# Altium schematic symbol library Diode%.SchLib: 376 symbols (part 2 of 9)
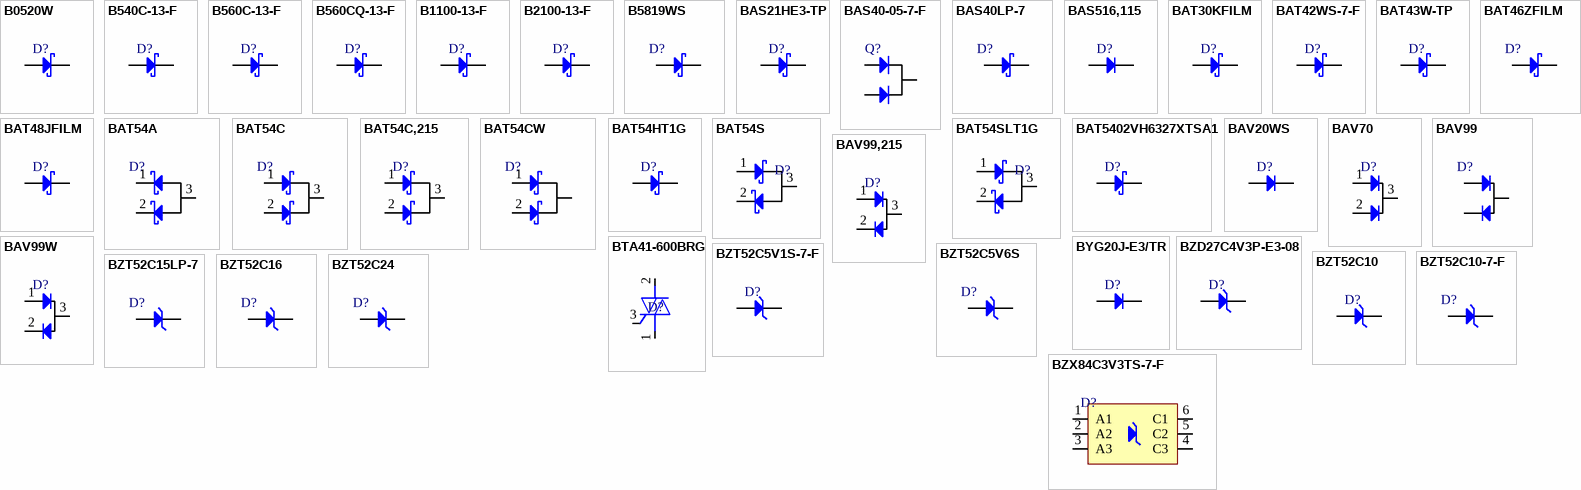
[diagram p10: symbols B0520W to BZX84C3V3TS-7-F]

## B2100-13-F
designator D?
DIODE SCHOTTKY 100V 2A SMB; Manufacturer: Diodes; Manufacturer Part Number: B2100-13-F; Package Body Material: Plastic; Diode Element Material: SILICON; Max Reverse Current: 500uA; Peak Non-Repetitive Surge Current: 50A; Number of Elements: 1; Forward Voltage: 790mV; Polarity: Standard; Value: 75pF; Application(s): EFFICIENCY; Diode Type: RECTIFIER; Time @ Peak Reflow Temperature-Max (s): 5s; Supplier: Future Electronics; LCSC Part Number: C110479; RoHS: Yes; Item Type: Diode; Stock: 591000; Pricing: 3000=0.0991, 6000=0.0966, 12000=0.0942, 15000=0.0934, 45000=0.0888 (USD); Mounting Technology: Surface Mount; Case/Package: SMB; Pins: 2; Weight: 0.00328oz; Package Shape: Rectangular; Terminal Finish: Tin; Min Operating Temperature: -65°C; Max Operating Temperature: 150°C; Forward Current: 2A; Max Repetitive Reverse Voltage (Vrrm): 100V; Package Quantity: 3000; Packaging: Tape and Reel; Average Rectified Current: 2A; Max Forward Surge Current (Ifsm): 50A; Termination: SMD/SMT; Voltage Rating (DC): 100V; Current Rating: 2A; Output Current: 2A; Max Reverse Voltage (DC): 100V; Series: -; JESD-30 Code: R-PDSO-C2; Terminal Form: C BEND; Terminal Position: DUAL; Number of Phases: 1; Surface Mount: Yes; Moisture Sensitivity Level: 1; Technology: SCHOTTKY; Peak Reflow Temperature (Cel): 245°C; Reverse Voltage: 100V; Length: 4.57mm; Width: 3.94mm; Height: 2.62mm; Radiation Hardening: No; Reach SVHC Compliant: No; Lead Free: Lead Free; RoHS Compliant: Yes; ComponentLink1URL: https://datasheet.ciiva.com/34302/1538742-34302357.pdf?src-supplier=Jameco; ComponentLink1Description: https://datasheet.ciiva.com/34302/1538742-34302357.pdf?src-supplier=Jameco; ComponentLink2URL: https://datasheet.ciiva.com/1177/ds30021-1177418.pdf?src-supplier=Element14; ComponentLink2Description: https://datasheet.ciiva.com/1177/ds30021-1177418.pdf?src-supplier=Element14; ComponentLink3URL: https://datasheet.ciiva.com/4715/ds30021-83821-4715727.pdf?src-supplier=Mouser; ComponentLink3Description: https://datasheet.ciiva.com/4715/ds30021-83821-4715727.pdf?src-supplier=Mouser; ComponentLink4URL: https://datasheet.ciiva.com/8300/ds30021-8300525.pdf?src-supplier=Avnet; ComponentLink4Description: https://datasheet.ciiva.com/8300/ds30021-8300525.pdf?src-supplier=Avnet; ComponentLink5URL: https://datasheet.ciiva.com/16217/ds30021-16217820.pdf?src-supplier=Future+Electronics; ComponentLink5Description: https://datasheet.ciiva.com/16217/ds30021-16217820.pdf?src-supplier=Future+Electronics; ComponentLink6URL: https://datasheet.ciiva.com/8303/ds30021-8303003.pdf?src-supplier=Avnet; ComponentLink6Description: https://datasheet.ciiva.com/8303/ds30021-8303003.pdf?src-supplier=Avnet; ComponentLink7URL: https://datasheet.ciiva.com/913/ds30021-913956.pdf?src-supplier=Digikey; ComponentLink7Description: https://datasheet.ciiva.com/913/ds30021-913956.pdf?src-supplier=Digikey; ComponentLink8URL: https://datasheet.ciiva.com/913/ds30021-913957.pdf?src-supplier=Digikey; ComponentLink8Description: https://datasheet.ciiva.com/913/ds30021-913957.pdf?src-supplier=Digikey; ComponentLink9URL: https://datasheet.ciiva.com/913/ds30021-913955.pdf?src-supplier=Digikey; ComponentLink9Description: https://datasheet.ciiva.com/913/ds30021-913955.pdf?src-supplier=Digikey
footprint SMB_
pins: 1 A, 2 K

## B5819WS
designator D?
DIODE SCHOTTKY 40V 1A SOD323; Manufacturer: MDD; Manufacturer Part Number: B5819WS-TP; Max Surge Current: 10A; Forward Voltage: 900mV; Max Reverse Leakage Current: 1mA; Element Configuration: Single; Supplier 1: Arrow Electronics; RoHS: Yes; Category: Rectifier Diodes; Stock 1: 1701; Pricing 1: 1=0.34370, 10=0.18990, 25=0.18810, 100=0.11820, 250=0.11700, 500=0.08890, 1000=0.07420 (USD); Mount: Surface Mount; Number of Pins: 2; Min Operating Temperature: -65°C; Max Operating Temperature: 125°C; Package Quantity: 1; Packaging: Tape and Reel; Average Rectified Current: 1A; Peak Non-Repetitive Surge Current: 10A; Max Reverse Voltage (DC): 40V; Series: -; Radiation Hardening: No; RoHS Compliant: Yes; Lead Free: Lead Free; Supplier Part Number 1: B5819WS-TP; ComponentLink1Description: LCSC; ComponentLink1URL: https://lcsc.com/product-detail/Schottky-Barrier-Diodes-SBD_MDD-Microdiode-Electronics-B5819WS_C64886.html; LCSC Part Number: C22624; Item Type: Diode
footprint SOD-323 (40V 600mV@1A 1A SOD-323 Schottky Barrier Diodes (SBD))
pins: 1 K, 2 A

## BAS21HE3-TP
designator D?
200V Independent Type 1.25V@200mA 50ns 200mA SOT-23 Switching Diodes ROHS; Manufacturer: MCC; Manufacturer Part Number: BAS21HE3-TP; Item Type: Diode; Package: SOT-23; LCSC Part Number: C3313195; ComponentLink1Description: LCSC; ComponentLink1URL: https://www.lcsc.com/product-detail/Switching-Diodes_MCC-Micro-Commercial-Components-BAS21HE3-TP_C3313195.html
footprint SOT-23 (TRANS NPN 40V 0.6A SOT23)
pins: 1 A, 3 K

## BAS40-05-7-F
designator Q?
DIODE ARR SCHOTT 40V 200MA SOT23; Manufacturer: Diodes; Manufacturer Part Number: BAS40-05-7-F; Item Type: Schottky Diodes; Reverse Recovery Time: 5ns; Peak Non-Repetitive Surge Current: 600mA; Forward Voltage: 1V; Max Reverse Current: 200nA; Max Power Dissipation: 350mW; Value: 4pF; Supplier: Rs; LCSC Part Number: C134359; RoHS: Yes; Stock: 2400; Pricing: 125=0.607, 250=0.53, 625=0.512, 1250=0.503 (DKK); Mounting Technology: Surface Mount; Case/Package: SOT-23; Pins: 3; Weight: 0.000282oz; Min Operating Temperature: -55°C; Max Operating Temperature: 125°C; Forward Current: 200mA; Max Repetitive Reverse Voltage (Vrrm): 40V; Package Quantity: 3000; Packaging: Tape and Reel; Average Rectified Current: 200mA; Power Dissipation: 350mW; Max Forward Surge Current (Ifsm): 600mA; Termination: SMD/SMT; Power Rating: 350mW; Max Reverse Voltage (DC): 40V; Series: -; Reverse Voltage: 40V; Length: 3.05mm; Width: 1.4mm; Height: 1mm; Radiation Hardening: No; Reach SVHC Compliant: No; Lead Free: Lead Free; RoHS Compliant: Yes; ComponentLink1URL: https://datasheet.ciiva.com/4715/ds11006-83462-4715645.pdf?src-supplier=Mouser; ComponentLink1Description: https://datasheet.ciiva.com/4715/ds11006-83462-4715645.pdf?src-supplier=Mouser
footprint SOT-23 (TRANS NPN 40V 0.6A SOT23)
pins: 1, 2, 3

## BAS40LP-7
designator D?
DIODE SCHOTTKY 40V 200MA 2DFN; Manufacturer: Diodes; Manufacturer Part Number: BAS40LP-7; Reverse Recovery Time: 5ns; Peak Non-Repetitive Surge Current: 600mA; Element Configuration: Single; Polarity: Standard; Forward Voltage: 1V; Max Reverse Current: 200nA; Power Dissipation: 250mW; Capacitance: 2.3pF; Supplier 1: Digi-Key; RoHS: Yes; Category: Schottky Diodes; Stock 1: 297276; Pricing 1: 1=0.40000, 10=0.32200, 100=0.21910, 500=0.16436, 1000=0.12326 (USD); Mount: Surface Mount; Case/Package: DFN; Number of Pins: 2; Contact Plating: Gold; Case Code (Imperial): 0402; Case Code (Metric): 1006; Min Operating Temperature: -55°C; Max Operating Temperature: 125°C; Packaging: Tape and Reel; Forward Current: 200mA; Max Repetitive Reverse Voltage (Vrrm): 40V; Package Quantity: 3000; Average Rectified Current: 200mA; Output Current: 200mA; Max Reverse Voltage (DC): 40V; Series: -; Max Forward Surge Current (Ifsm): 600mA; Power Rating: 250mW; Length: 1mm; Width: 0.6mm; Height: 0.47mm; Radiation Hardening: No; RoHS Compliant: Yes; Reach SVHC Compliant: Yes; Lead Free: Lead Free; ComponentLink1URL: https://datasheet.ciiva.com/4715/ds30503-87596-4715640.pdf?src-supplier=Mouser; ComponentLink1Description: https://datasheet.ciiva.com/4715/ds30503-87596-4715640.pdf?src-supplier=Mouser; ComponentLink2URL: https://datasheet.ciiva.com/16199/ds30503-16199776.pdf?src-supplier=Future+Electronics; ComponentLink2Description: https://datasheet.ciiva.com/16199/ds30503-16199776.pdf?src-supplier=Future+Electronics; ComponentLink3URL: https://datasheet.ciiva.com/1180/ds30503-1180004.pdf?src-supplier=Element14; ComponentLink3Description: https://datasheet.ciiva.com/1180/ds30503-1180004.pdf?src-supplier=Element14; ComponentLink4URL: https://datasheet.ciiva.com/8303/ds30503-8303229.pdf?src-supplier=Avnet; ComponentLink4Description: https://datasheet.ciiva.com/8303/ds30503-8303229.pdf?src-supplier=Avnet; ComponentLink5URL: https://datasheet.ciiva.com/914/ds30503-914315.pdf?src-supplier=Digi-Key; ComponentLink5Description: https://datasheet.ciiva.com/914/ds30503-914315.pdf?src-supplier=Digi-Key; Supplier Part Number 1: BAS40LPDICT-ND; LCSC Part Number: C124200; Item Type: Diode
footprint DFN1006-2L_
pins: 1 K, 2 A

## BAS516,115
designator D?
DIODE GEN PURP 100V 250MA SOD523; Manufacturer: Nexperia; Manufacturer Part Number: BAS516,115; Max Reverse Current: 50uA; Max Forward Surge Current (Ifsm): 4A; Value: 1pF; Supplier: Future Electronics; LCSC Part Number: C10037; RoHS: Yes; Item Type: Diode; Stock: 4176000; Pricing: 3000=0.0153, 12000=0.0146, 30000=0.0142, 75000=0.0138, 120000=0.0132 (USD); Pins: 2NUMBER; Max Repetitive Reverse Voltage (Vrrm): 100V; Forward Current: 250mA; Reverse Voltage: 100V; Height: 650um; RoHS Compliant: Yes; ComponentLink1URL: http://www.farnell.com/datasheets/1856332.pdf?src-supplier=Farnell; ComponentLink1Description: http://www.farnell.com/datasheets/1856332.pdf?src-supplier=Farnell; ComponentLink2URL: https://datasheet.octopart.com/BAS516%2C115-Nexperia-datasheet-32749520.pdf?src-supplier=Newark; ComponentLink2Description: https://datasheet.octopart.com/BAS516%2C115-Nexperia-datasheet-32749520.pdf?src-supplier=Newark; ComponentLink3URL: https://assets.nexperia.com/documents/data-sheet/BAS16_SER.pdf?src-supplier=Digikey; ComponentLink3Description: https://assets.nexperia.com/documents/data-sheet/BAS16_SER.pdf?src-supplier=Digikey; ComponentLink4URL: https://datasheet.octopart.com/BAS516%2C115-Nexperia-datasheet-81455687.pdf?src-supplier=TME; ComponentLink4Description: https://datasheet.octopart.com/BAS516%2C115-Nexperia-datasheet-81455687.pdf?src-supplier=TME
footprint SOD-523 (SOD-523 Schottky Barrier Diodes (SBD) ROHS)
pins: 1 A, 2 K

## BAT30KFILM
designator D?
DIODE SCHOTTKY 30V 300MA SOD523; Manufacturer: STMicroelectronics; Manufacturer Part Number: BAT30KFILM; Supplier: Digikey; LCSC Part Number: C2926449; RoHS: Yes; Item Type: Diode; Stock: 129643; Pricing: 1=0.33, 10=0.204, 100=0.1279, 500=0.09468, 1000=0.08393 (USD); ComponentLink1URL: https://datasheet.ciiva.com/15192/getdatasheetpartid-146449-15192970.pdf?src-supplier=Verical; ComponentLink1Description: https://datasheet.ciiva.com/15192/getdatasheetpartid-146449-15192970.pdf?src-supplier=Verical; ComponentLink2URL: https://datasheet.ciiva.com/16418/cd00126118-16418392.pdf?src-supplier=Future+Electronics; ComponentLink2Description: https://datasheet.ciiva.com/16418/cd00126118-16418392.pdf?src-supplier=Future+Electronics; ComponentLink3URL: https://datasheet.ciiva.com/915/cd00126118-915601.pdf?src-supplier=Digikey; ComponentLink3Description: https://datasheet.ciiva.com/915/cd00126118-915601.pdf?src-supplier=Digikey; ComponentLink4URL: https://datasheet.ciiva.com/915/cd00126118-915602.pdf?src-supplier=Digikey; ComponentLink4Description: https://datasheet.ciiva.com/915/cd00126118-915602.pdf?src-supplier=Digikey; ComponentLink5URL: https://datasheet.ciiva.com/915/cd00126118-915603.pdf?src-supplier=Digikey; ComponentLink5Description: https://datasheet.ciiva.com/915/cd00126118-915603.pdf?src-supplier=Digikey
footprint SOD-523 (SOD-523 Schottky Barrier Diodes (SBD) ROHS)
pins: 1 A, 2 K

## BAT42WS-7-F
designator D?
DIODE SCHOTTKY 30V 200MA SOD323; Manufacturer: Diodes; Manufacturer Part Number: BAT42WS-7-F; Supplier: Future Electronics; LCSC Part Number: C134397; RoHS: Yes; Item Type: Diode; Stock: 6000; Pricing: 3000=0.0556, 9000=0.0535, 15000=0.0526, 30000=0.0499, 45000=0.0506, 60000=0.048, 75000=0.0489 (USD); ComponentLink1URL: https://datasheet.ciiva.com/4715/ds30100-83070-4715539.pdf?src-supplier=Mouser; ComponentLink1Description: https://datasheet.ciiva.com/4715/ds30100-83070-4715539.pdf?src-supplier=Mouser; ComponentLink2URL: https://datasheet.ciiva.com/8301/ds30100-8301357.pdf?src-supplier=Avnet; ComponentLink2Description: https://datasheet.ciiva.com/8301/ds30100-8301357.pdf?src-supplier=Avnet; ComponentLink3URL: https://datasheet.ciiva.com/1180/ds30100-1180188.pdf?src-supplier=Element14; ComponentLink3Description: https://datasheet.ciiva.com/1180/ds30100-1180188.pdf?src-supplier=Element14; ComponentLink4URL: https://datasheet.ciiva.com/912/ds30100-912909.pdf?src-supplier=Digikey; ComponentLink4Description: https://datasheet.ciiva.com/912/ds30100-912909.pdf?src-supplier=Digikey; ComponentLink5URL: https://datasheet.ciiva.com/912/ds30100-912910.pdf?src-supplier=Digikey; ComponentLink5Description: https://datasheet.ciiva.com/912/ds30100-912910.pdf?src-supplier=Digikey; ComponentLink6URL: https://datasheet.ciiva.com/912/ds30100-912911.pdf?src-supplier=Digikey; ComponentLink6Description: https://datasheet.ciiva.com/912/ds30100-912911.pdf?src-supplier=Digikey
footprint SOD-323
pins: 1 K, 2 A

## BAT43W-TP
designator D?
DIODE SCHOTTKY 30V 200MA SOD123; Manufacturer: Micro Commercial Co; Manufacturer Part Number: BAT43W-TP; Package: SOD-123; LCSC Part Number: C914267; Item Type: Diode; ComponentLink1Description: LCSC; ComponentLink1URL: https://www.lcsc.com/product-detail/Schottky-Barrier-Diodes-SBD_MCC-Micro-Commercial-Components-BAT43W-TP_C914267.html
footprint SOD-123
pins: 1 A, 2 K

## BAT46ZFILM
designator D?
DIODE SCHOTTKY 100V 150MA SOD123; Manufacturer: STMicroelectronics; Manufacturer Part Number: BAT46ZFILM; Peak Non-Repetitive Surge Current: 1A; Forward Voltage: 1V; Max Reverse Current: 5uA; Polarity: Standard; Current Rating: 160mA; Value: 10pF; Item Type: Schottky Diode; Supplier: Mouser; Supplier Part Number: 511-BAT46ZFILM; RoHS: Yes; Category: Rectifier Diodes; Stock: 123459; Pricing: 1=0.44, 10=0.307, 50=0.307, 100=0.124, 1000=0.093, 10000=0.064 (USD); Mounting Technology: Surface Mount; Pins: 2; Min Operating Temperature: -65°C; Max Operating Temperature: 150°C; Forward Current: 150mA; Max Repetitive Reverse Voltage (Vrrm): 100V; Max Surge Current: 1A; Package Quantity: 3000; Packaging: Tape and Reel; Max Reverse Leakage Current: 5uA; Average Rectified Current: 150mA; Max Forward Surge Current (Ifsm): 1A; Voltage Rating (DC): 100V; Output Current: 150mA; Max Reverse Voltage (DC): 100V; Series: -; Length: 2.85mm; Width: 1.7mm; Height: 1.35mm; Radiation Hardening: No; Reach SVHC Compliant: No; Lead Free: Lead Free; RoHS Compliant: Yes; ComponentLink1URL: https://datasheet.ciiva.com/23920/cd00004930-23920128.pdf?src-supplier=Newark; ComponentLink1Description: https://datasheet.ciiva.com/23920/cd00004930-23920128.pdf?src-supplier=Newark; ComponentLink2URL: https://datasheet.ciiva.com/14168/cd00004930-14168058.pdf?src-supplier=Distrelec; ComponentLink2Description: https://datasheet.ciiva.com/14168/cd00004930-14168058.pdf?src-supplier=Distrelec; ComponentLink3URL: https://datasheet.ciiva.com/4714/cd00004930-111868-4714530.pdf?src-supplier=Mouser; ComponentLink3Description: https://datasheet.ciiva.com/4714/cd00004930-111868-4714530.pdf?src-supplier=Mouser; ComponentLink4URL: https://datasheet.ciiva.com/17097/bat46zfilm-17097700.pdf?src-supplier=Allied+Electronics; ComponentLink4Description: https://datasheet.ciiva.com/17097/bat46zfilm-17097700.pdf?src-supplier=Allied+Electronics; ComponentLink5URL: https://datasheet.ciiva.com/22733/1761349-22733179.pdf?src-supplier=Element14; ComponentLink5Description: https://datasheet.ciiva.com/22733/1761349-22733179.pdf?src-supplier=Element14; ComponentLink6URL: https://datasheet.ciiva.com/915/cd00004930-915572.pdf?src-supplier=Digi-Key; ComponentLink6Description: https://datasheet.ciiva.com/915/cd00004930-915572.pdf?src-supplier=Digi-Key; ComponentLink7URL: https://datasheet.ciiva.com/915/cd00004930-915571.pdf?src-supplier=Digi-Key; ComponentLink7Description: https://datasheet.ciiva.com/915/cd00004930-915571.pdf?src-supplier=Digi-Key; ComponentLink8URL: https://datasheet.ciiva.com/915/cd00004930-915573.pdf?src-supplier=Digi-Key; ComponentLink8Description: https://datasheet.ciiva.com/915/cd00004930-915573.pdf?src-supplier=Digi-Key; ComponentLink9URL: https://datasheet.ciiva.com/16221/cd00004930-16221159.pdf?src-supplier=Future+Electronics; ComponentLink9Description: https://datasheet.ciiva.com/16221/cd00004930-16221159.pdf?src-supplier=Future+Electronics; ComponentLink10URL: https://datasheet.ciiva.com/15144/getdatasheetpartid-89559-15144645.pdf?src-supplier=Verical; ComponentLink10Description: https://datasheet.ciiva.com/15144/getdatasheetpartid-89559-15144645.pdf?src-supplier=Verical; LCSC Part Number: C283255
footprint SOD-123
pins: 1 A, 2 K

## BAT48JFILM
designator D?
DIODE SCHOTTKY 40V 350MA SOD323; Manufacturer: STMicroelectronics; Manufacturer Part Number: BAT48JFILM; Supplier: Future Electronics; LCSC Part Number: C2798199; RoHS: Yes; Item Type: Diode; Stock: 21000; Pricing: 3000=0.0329, 9000=0.0316, 15000=0.031, 30000=0.0303, 60000=0.0291 (USD); ComponentLink1URL: https://datasheet.ciiva.com/23920/1449576-23920129.pdf?src-supplier=Newark; ComponentLink1Description: https://datasheet.ciiva.com/23920/1449576-23920129.pdf?src-supplier=Newark; ComponentLink2URL: https://datasheet.ciiva.com/4714/cd00130229-113731-4714649.pdf?src-supplier=Mouser; ComponentLink2Description: https://datasheet.ciiva.com/4714/cd00130229-113731-4714649.pdf?src-supplier=Mouser; ComponentLink3URL: https://datasheet.ciiva.com/915/cd00130229-915689.pdf?src-supplier=Digikey; ComponentLink3Description: https://datasheet.ciiva.com/915/cd00130229-915689.pdf?src-supplier=Digikey; ComponentLink4URL: https://datasheet.ciiva.com/915/cd00130229-915690.pdf?src-supplier=Digikey; ComponentLink4Description: https://datasheet.ciiva.com/915/cd00130229-915690.pdf?src-supplier=Digikey; ComponentLink5URL: https://datasheet.ciiva.com/915/cd00130229-915691.pdf?src-supplier=Digikey; ComponentLink5Description: https://datasheet.ciiva.com/915/cd00130229-915691.pdf?src-supplier=Digikey; ComponentLink6URL: https://datasheet.ciiva.com/16206/cd00130229-16206668.pdf?src-supplier=Future+Electronics; ComponentLink6Description: https://datasheet.ciiva.com/16206/cd00130229-16206668.pdf?src-supplier=Future+Electronics
footprint SOD-323
pins: 1 K, 2 A

## BAT54A
designator D?
Diode Small Signal Schottky 30V 0.2A Automotive 3-Pin SOT-23 T/R; Manufacturer: MDD; Manufacturer Part Number: BAT54A; Package: SOT-23; ComponentLink2Description: LCSC; ComponentLink2URL: https://www.lcsc.com/product-detail/Schottky-Barrier-Diodes-SBD_MDD-Microdiode-Electronics-BAT54A_C3013395.html; LCSC Part Number: C3013395; Item Type: Diode
footprint SOT-23 (TRANS NPN 40V 0.6A SOT23)
pins: 1 K, 2 K, 3 A

## BAT54C
designator D?
30V Dual Common Cathode 1V@100mA 200mA SOT-23(TO-236) Schottky Barrier Diodes (SBD) ROHS; Manufacturer Part Number: BAT54C; Manufacturer: Shandong Jingdao Microelectronics; Item Type: Diode; LCSC Part Number: C2762215; ComponentLink1Description: LCSC; ComponentLink1URL: https://www.lcsc.com/product-detail/Schottky-Barrier-Diodes-SBD_Shandong-Jingdao-Microelectronics-BAT54C_C2762215.html; Package: SOT-23(TO-236)
footprint SOT-23 (TRANS NPN 40V 0.6A SOT23)
pins: 1 A, 2 A, 3 K

## BAT54C,215
designator D?
DIODE ARR SCHOTT 30V TO236AB; Manufacturer: Nexperia; Manufacturer Part Number: BAT54C,215; Forward Current: 200mA; Forward Voltage: 800mV; Max Forward Surge Current (Ifsm): 600mA; Max Reverse Current: 2uA; Value: 10pF; Supplier: Arrow Electronics; LCSC Part Number: C37704; RoHS: Yes; Item Type: Diode; Stock: 1449000; Pricing: 3000=0.0198, 9000=0.0153, 24000=0.0138, 45000=0.0113 (USD); Case/Package: 926Case; Pins: 3NUMBER; Max Operating Temperature: 150°C; Packaging: 13Packaging; Reverse Voltage: 30V; Height: 1.1mm; RoHS Compliant: 5897YesNo; ComponentLink1URL: http://www.farnell.com/datasheets/1668625.pdf?src-supplier=Farnell; ComponentLink1Description: http://www.farnell.com/datasheets/1668625.pdf?src-supplier=Farnell; ComponentLink2URL: https://datasheet.octopart.com/BAT54C%2C215-Nexperia-datasheet-13434831.pdf?src-supplier=Element14; ComponentLink2Description: https://datasheet.octopart.com/BAT54C%2C215-Nexperia-datasheet-13434831.pdf?src-supplier=Element14; ComponentLink3URL: https://assets.nexperia.com/documents/data-sheet/BAT54_SER.pdf?src-supplier=Digikey; ComponentLink3Description: https://assets.nexperia.com/documents/data-sheet/BAT54_SER.pdf?src-supplier=Digikey; ComponentLink4URL: https://datasheet.octopart.com/BAT54C%2C215-Nexperia-datasheet-164353998.pdf?src-supplier=Future+Electronics; ComponentLink4Description: https://datasheet.octopart.com/BAT54C%2C215-Nexperia-datasheet-164353998.pdf?src-supplier=Future+Electronics; ComponentLink5URL: https://datasheet.octopart.com/BAT54C%2C215-Nexperia-datasheet-8503290.pdf?src-supplier=TME; ComponentLink5Description: https://datasheet.octopart.com/BAT54C%2C215-Nexperia-datasheet-8503290.pdf?src-supplier=TME
footprint SOT-23 (TRANS NPN 40V 0.6A SOT23)
pins: 1 A, 2 A, 3 K

## BAT54CW
designator D?
DIODE SCHOTTKY 30V 100MA SOT323; Manufacturer: ON Semiconductor / Fairchild; Manufacturer Part Number: BAT54CWT1G; Element Configuration: Common Cathode; Forward Current: 200mA; Forward Voltage: 800mV; Reverse Recovery Time: 5ns; Peak Non-Repetitive Surge Current: 600mA; Max Reverse Current: 2uA; Power Dissipation: 200mW; Supplier 1: Mouser; RoHS: Yes; Category: Schottky Diodes; Pricing 1: 1=0.22000, 10=0.18400, 50=0.18400, 100=0.09800, 500=0.06400, 1000=0.04400, 3000=0.03400, 10000=0.03400 (USD); Mount: Surface Mount; Case/Package: SOT-323; Number of Pins: 3; Contact Plating: Tin,Matte; Weight: 0.03g; Min Operating Temperature: -55°C; Max Operating Temperature: 125°C; Packaging: Tape and Reel; Package Quantity: 1; Max Repetitive Reverse Voltage (Vrrm): 30V; Average Rectified Current: 200mA; Max Forward Surge Current (Ifsm): 600mA; Max Reverse Voltage (DC): 30V; Max Surge Current: 600mA; Max Reverse Leakage Current: 2uA; Series: -; Recovery Time: 5ns; Length: 2.2mm; Width: 1.35mm; Height: 0.9mm; Radiation Hardening: No; RoHS Compliant: Yes; Lead Free: Lead Free; REACH SVHC: No SVHC; ComponentLink1URL: https://datasheet.ciiva.com/905/bat54cwt1-d-905845.pdf?src-supplier=Digi-Key; ComponentLink1Description: https://datasheet.ciiva.com/905/bat54cwt1-d-905845.pdf?src-supplier=Digi-Key; ComponentLink2URL: https://datasheet.ciiva.com/28381/1708235-28381253.pdf?src-supplier=Element14; ComponentLink2Description: https://datasheet.ciiva.com/28381/1708235-28381253.pdf?src-supplier=Element14; ComponentLink3URL: https://datasheet.ciiva.com/22651/1706529-22651951.pdf?src-supplier=Element14; ComponentLink3Description: https://datasheet.ciiva.com/22651/1706529-22651951.pdf?src-supplier=Element14; ComponentLink4URL: https://datasheet.ciiva.com/4715/bat54cwt1g-102392-4715466.pdf?src-supplier=Mouser; ComponentLink4Description: https://datasheet.ciiva.com/4715/bat54cwt1g-102392-4715466.pdf?src-supplier=Mouser; ComponentLink5URL: https://datasheet.ciiva.com/4715/bat54cwt1-d-111181-4715156.pdf?src-supplier=Mouser; ComponentLink5Description: https://datasheet.ciiva.com/4715/bat54cwt1-d-111181-4715156.pdf?src-supplier=Mouser; ComponentLink6URL: https://datasheet.ciiva.com/22659/1708235-22659015.pdf?src-supplier=Element14; ComponentLink6Description: https://datasheet.ciiva.com/22659/1708235-22659015.pdf?src-supplier=Element14; ComponentLink7URL: https://datasheet.ciiva.com/8303/bat54cwt1g-8303708.pdf?src-supplier=Avnet; ComponentLink7Description: https://datasheet.ciiva.com/8303/bat54cwt1g-8303708.pdf?src-supplier=Avnet; ComponentLink8URL: https://datasheet.ciiva.com/8303/bat54cwt1g-8303706.pdf?src-supplier=Avnet; ComponentLink8Description: https://datasheet.ciiva.com/8303/bat54cwt1g-8303706.pdf?src-supplier=Avnet; ComponentLink9URL: https://datasheet.ciiva.com/6390/bat54cwt1g-6390474.pdf?src-supplier=Digi-Key; ComponentLink9Description: https://datasheet.ciiva.com/6390/bat54cwt1g-6390474.pdf?src-supplier=Digi-Key; ComponentLink10URL: https://datasheet.ciiva.com/905/bat54cwt1-d-905846.pdf?src-supplier=Digi-Key; ComponentLink10Description: https://datasheet.ciiva.com/905/bat54cwt1-d-905846.pdf?src-supplier=Digi-Key; ComponentLink11URL: https://datasheet.ciiva.com/905/bat54cwt1-d-905847.pdf?src-supplier=Digi-Key; ComponentLink11Description: https://datasheet.ciiva.com/905/bat54cwt1-d-905847.pdf?src-supplier=Digi-Key; Supplier Part Number 1: 863-BAT54CWT1G; LCSC Part Number: C77321; Item Type: Diode
footprint SOT_323
pins: 1 A, 2 A, 3 K

## BAT54HT1G
designator D?
30V Independent Type 1V@100mA 200mA SOD-323 Schottky Diodes ROHS; Manufacturer: FUXINSEMI; Manufacturer Part Number: BAT54HT1G; Item Type: Diode; Package: SOD-323; LCSC Part Number: C7422626; ComponentLink1Description: LCSC; ComponentLink1URL: https://www.lcsc.com/product-detail/Schottky-Diodes_FUXINSEMI-BAT54HT1G_C7422626.html
footprint SOD-323
pins: 1 K, 2 A

## BAT54S
designator D?
30V Dual 200mA 800mV@100mA SOT-23 Schottky Barrier Diodes (SBD) ROHS; Manufacturer: JSMSEMI; Manufacturer Part Number: BAT54S; Item Type: Diode; Package: SOT-23; LCSC Part Number: C916425; ComponentLink1Description: LCSC; ComponentLink1URL: https://www.lcsc.com/product-detail/Schottky-Barrier-Diodes-SBD_JSMSEMI-BAT54S_C916425.html
footprint SOT-23 (TRANS NPN 40V 0.6A SOT23)
pins: 1 A, 2 K, 3 A/K

## BAT54SLT1G
designator D?
DIODE ARR SCHOTT 30V 200MA SOT23; Manufacturer: ON Semiconductor; Manufacturer Part Number: BAT54SLT1G; Max Surge Current: 600mA; Forward Voltage: 800mV; Max Reverse Current: 2uA; Recovery Time: 5ns; Element Configuration: Dual; Peak Non-Repetitive Surge Current: 1A; Power Dissipation: 225mW; Value: 7.6pF; Supplier: Future Electronics; LCSC Part Number: C19726; RoHS: No; Item Type: Diode; Stock: 10110000; Pricing: 3000=0.0141, 12000=0.0135, 30000=0.0131, 75000=0.0128, 120000=0.0122 (USD); Case/Package: SOT-23-3; Pins: 3; Min Operating Temperature: -55°C; Max Operating Temperature: 150°C; Forward Current: 200mA; Packaging: Tape and Reel; Max Repetitive Reverse Voltage (Vrrm): 30V; Current Rating: 200mA; Voltage Rating (DC): 30V; Package Quantity: 1; Average Rectified Current: 200mA; Reverse Recovery Time: 5ns; Max Reverse Leakage Current: 2uA; Max Forward Surge Current (Ifsm): 600mA; Max Reverse Voltage (DC): 30V; Series: -; Reverse Voltage: 30V; Length: 2.9mm; Width: 1.3mm; Height: 0.94mm; Radiation Hardening: No; Lead Free: Lead Free; Halogen Free: Halogen Free; Reach SVHC Compliant: No; ComponentLink1URL: https://datasheet.ciiva.com/1180/bat54slt1-d-1180304.pdf?src-supplier=Element14; ComponentLink1Description: https://datasheet.ciiva.com/1180/bat54slt1-d-1180304.pdf?src-supplier=Element14; ComponentLink2URL: https://datasheet.ciiva.com/1180/bat54slt1-d-1180305.pdf?src-supplier=Element14; ComponentLink2Description: https://datasheet.ciiva.com/1180/bat54slt1-d-1180305.pdf?src-supplier=Element14; ComponentLink3URL: https://datasheet.ciiva.com/14558/70099484-14558437.pdf?src-supplier=Allied+Electronics; ComponentLink3Description: https://datasheet.ciiva.com/14558/70099484-14558437.pdf?src-supplier=Allied+Electronics
footprint SOT-23 (TRANS NPN 40V 0.6A SOT23)
pins: 1 A, 2 K, 3 A/K

## BAT5402VH6327XTSA1
designator D?
DIODE SCHOTTKY 30V 200MA SC79-2; Manufacturer: Infineon; Manufacturer Part Number: BAT5402VH6327XTSA1; Value: 10pF; Item Type: Diode; Supplier: Mouser; Supplier Part Number: 726-BAT5402VH6327XTS; RoHS: Yes; Category: Rectifier Diodes; Stock: 316819; Pricing: 1=0.39, 10=0.245, 50=0.245, 100=0.122, 1000=0.103, 10000=0.071 (USD); Package Quantity: 3000NUMBER; Reverse Voltage: 30V
footprint SOD-523 (SOD-523 Schottky Barrier Diodes (SBD) ROHS)
pins: 1 A, 2 K

## BAV20WS
designator D?
200V Single 1.25V@200mA 50ns 250mA SOD-323 Switching Diode ROHS; Manufacturer: Shandong Jingdao Microelectronics; Manufacturer Part Number: BAV20WS; Package: SOD-323; LCSC Part Number: C382944; Item Type: Diode; ComponentLink1Description: LCSC; ComponentLink1URL: https://www.lcsc.com/product-detail/Switching-Diode_Shandong-Jingdao-Microelectronics-BAV20WS_C382944.html
footprint SOD-323
pins: 1 K, 2 A

## BAV70
designator D?
70V 225mW Dual Common Cathode 1.25V@150mA 6ns 200mA SOT-23 Switching Diode ROHS; Manufacturer: TWGMC; Manufacturer Part Number: BAV70; Package: SOT-23; LCSC Part Number: C727123; Item Type: Diode; ComponentLink1Description: LCSC; ComponentLink1URL: https://www.lcsc.com/product-detail/Switching-Diode_TWGMC-BAV70_C727123.html
footprint SOT-23 (TRANS NPN 40V 0.6A SOT23)
pins: 1, 2, 3

## BAV99
designator D?
80V 225mW Dual 1.25V@150mA 4ns 200mA SOT-23 Switching Diode ROHS; Manufacturer: FOSAN; Manufacturer Part Number: BAV99; Package: SOT-23; LCSC Part Number: C2926147; Item Type: Diode; ComponentLink1Description: LCSC; ComponentLink1URL: https://www.lcsc.com/product-detail/Switching-Diode_FOSAN-BAV99_C2926147.html
footprint SOT-23 (TRANS NPN 40V 0.6A SOT23)
pins: 1, 2, 3

## BAV99,215
designator D?
DIODE ARR GP 100V 215MA TO-236AB; Manufacturer: Nexperia; Manufacturer Part Number: BAV99,215; Item Type: Diodes; Forward Voltage: 1.25V; Breakdown Voltage: 75V; Forward Current: 125mA; Max Forward Surge Current (Ifsm): 500mA; Max Reverse Current: 500nA; Value: 1.5pF; Supplier: Future Electronics; LCSC Part Number: C2500; RoHS: Yes; Stock: 20217000; Pricing: 3000=0.008, 12000=0.0077, 30000=0.0075, 75000=0.0073, 120000=0.007 (USD); Pins: 3NUMBER; Max Operating Temperature: 150°C; Max Repetitive Reverse Voltage (Vrrm): 100V; Reverse Voltage: 100V; Height: 1.1mm; RoHS Compliant: Yes; ComponentLink1URL: http://www.farnell.com/datasheets/953882.pdf?src-supplier=Farnell; ComponentLink1Description: http://www.farnell.com/datasheets/953882.pdf?src-supplier=Farnell; ComponentLink2URL: http://www.farnell.com/datasheets/953882.pdf?src-supplier=Newark; ComponentLink2Description: http://www.farnell.com/datasheets/953882.pdf?src-supplier=Newark; ComponentLink3URL: https://datasheet.octopart.com/BAV99%2C215-Nexperia-datasheet-10109661.pdf?src-supplier=Element14; ComponentLink3Description: https://datasheet.octopart.com/BAV99%2C215-Nexperia-datasheet-10109661.pdf?src-supplier=Element14; ComponentLink4URL: https://assets.nexperia.com/documents/data-sheet/BAV99_SER.pdf?src-supplier=Digikey; ComponentLink4Description: https://assets.nexperia.com/documents/data-sheet/BAV99_SER.pdf?src-supplier=Digikey; ComponentLink5URL: https://datasheet.octopart.com/BAV99%2C215-Nexperia-datasheet-87580883.pdf?src-supplier=Newark; ComponentLink5Description: https://datasheet.octopart.com/BAV99%2C215-Nexperia-datasheet-87580883.pdf?src-supplier=Newark
footprint SOT-23 (TRANS NPN 40V 0.6A SOT23)
pins: 1, 2, 3

## BAV99W
designator D?
75V Dual 1.25V@150mA 4ns 150mA SOT-323 Switching Diode ROHS; Manufacturer: MSKSEMI; Manufacturer Part Number: BAV99W; Package: SOT-323; LCSC Part Number: C5240626; Item Type: Diode; ComponentLink1Description: LCSC; ComponentLink1URL: https://www.lcsc.com/product-detail/Switching-Diode_MSKSEMI-BAV99W_C5240626.html
footprint SOT_323
pins: 1, 2, 3

## BTA41-600BRG
designator D?
80mA 50mA 600V TOP-3 Thyristors (SCR)/Modules ROHS; Manufacturer: STMicroelectronics; Manufacturer Part Number: BTA41-600BRG; ComponentLink1Description: LCSC Link; ComponentLink1URL: https://www.lcsc.com/product-detail/Thyristors-SCR-Modules_STMicroelectronics-BTA41-600BRG_C9103.html; LCSC Part Number: C9103; Item Type: Thyristors; Package: TOP-3
footprint TOP3
pins: 1 M1, 2 M2, 3 G

## BYG20J-E3/TR
designator D?
DIODE AVAL 600V 1.5A DO214AC; Manufacturer: Vishay Semiconductors; Manufacturer Part Number: BYG20J-E3/TR; Item Type: Diodes; Supplier: Mouser; LCSC Part Number: C241925; RoHS: Yes; Stock: 105610; Pricing: 1=0.34, 10=0.207, 50=0.207, 100=0.145, 1000=0.096, 10000=0.088 (USD); ComponentLink1URL: https://datasheet.ciiva.com/23642/1748785-23642024.pdf?src-supplier=Newark; ComponentLink1Description: https://datasheet.ciiva.com/23642/1748785-23642024.pdf?src-supplier=Newark; ComponentLink2URL: https://datasheet.ciiva.com/4452/byg20d-205199-4452450.pdf?src-supplier=Mouser; ComponentLink2Description: https://datasheet.ciiva.com/4452/byg20d-205199-4452450.pdf?src-supplier=Mouser; ComponentLink3URL: https://datasheet.ciiva.com/5779/1795675-5779021.pdf?src-supplier=Farnell; ComponentLink3Description: https://datasheet.ciiva.com/5779/1795675-5779021.pdf?src-supplier=Farnell; ComponentLink4URL: https://datasheet.ciiva.com/1178/57063-1178161.pdf?src-supplier=Element14; ComponentLink4Description: https://datasheet.ciiva.com/1178/57063-1178161.pdf?src-supplier=Element14; ComponentLink5URL: https://datasheet.ciiva.com/1178/57063-1178162.pdf?src-supplier=Element14; ComponentLink5Description: https://datasheet.ciiva.com/1178/57063-1178162.pdf?src-supplier=Element14
footprint SMA(DO-214AC)
pins: 1 K, 2 A

## BZD27C4V3P-E3-08
designator D?
Zener Diode, 4.3V V(Z), 6.98%, 0.8W, Silicon, Unidirectional, DO-219AB; Manufacturer: Vishay Semiconductors; Manufacturer Part Number: BZD27C4V3P-E3-08; Item Type: Diodes; Supplier 1: Avnet; RoHS: Yes; Stock 1: 3843; Pricing 1: 1=0.402, 25=0.32, 100=0.165, 250=0.149, 500=0.133 (USD); ComponentLink1URL: https://datasheet.ciiva.com/36856/1734670-36856998.pdf?src-supplier=Element14; ComponentLink1Description: https://datasheet.ciiva.com/36856/1734670-36856998.pdf?src-supplier=Element14; Supplier Part Number 1: 20H3622; LCSC Part Number: C3738778
footprint DO-219AB (SMF)
pins: 1 A, 2 K

## BZT52C5V1S-7-F
designator D?
DIODE ZENER 5.1V 200MW SOD323; Manufacturer: Diodes; Manufacturer Part Number: BZT52C5V1S-7-F; Max Reverse Leakage Current: 1uA; Tolerance: 6%; Forward Voltage: 900mV; Impedance: 60R; Zener Current: 5mA; Output Current: 50mA; ESD Protection: No; Supplier: Future Electronics; LCSC Part Number: C151348; RoHS: Yes; Item Type: Diodes; Stock: 30000; Pricing: 3000=0.0261, 9000=0.0252, 15000=0.0248, 60000=0.0236, 90000=0.0229 (USD); Mounting Technology: Surface Mount; Pins: 2; Weight: 0.000173oz; Contact Plating: Tin,Matte; Min Operating Temperature: -65°C; Max Operating Temperature: 150°C; Max Power Dissipation: 200mW; Zener Voltage: 5.1V; Packaging: Tape and Reel; Package Quantity: 3000; Power Dissipation: 200mW; Voltage Tolerance: 6%; Test Current: 5mA; Working Voltage: 5.1V; Max Reverse Current: 1uA; Termination: SMD/SMT; Power Rating: 200mW; Voltage Rating (DC): 5.1V; Series: -; Length: 1.8mm; Width: 1.4mm; Height: 1mm; Radiation Hardening: No; Lead Free: Lead Free; RoHS Compliant: Yes; ComponentLink1URL: https://datasheet.ciiva.com/15142/getdatasheetpartid-61177-15142295.pdf?src-supplier=Verical; ComponentLink1Description: https://datasheet.ciiva.com/15142/getdatasheetpartid-61177-15142295.pdf?src-supplier=Verical; ComponentLink2URL: https://datasheet.ciiva.com/25623/0900766b8104c1f1-25623741.pdf?src-supplier=Rs; ComponentLink2Description: https://datasheet.ciiva.com/25623/0900766b8104c1f1-25623741.pdf?src-supplier=Rs
footprint SOD-323
pins: 1 K, 2 A

## BZT52C5V6S
designator D?
Single 5.2V~6V 200mW 5.6V SOD-323 Zener Diodes ROHS; Manufacturer: Jiangsu Changjing Electronics Technology Co.; Manufacturer Part Number: BZT52C5V6S; Item Type: Diode; Package: SOD-323; LCSC Part Number: C22612; ComponentLink1Description: LCSC; ComponentLink1URL: https://www.lcsc.com/product-detail/Zener-Diodes_Jiangsu-Changjing-Electronics-Technology-Co-Ltd-BZT52C5V6S_C22612.html
footprint SOD-323
pins: 1 K, 2 A

## BZT52C10
designator D?
Independent Type 9.4V~10.6V 500mW 10V SOD-123 Zener Diodes ROHS; Manufacturer: Shikues; Manufacturer Part Number: BZT52C10; Item Type: Diode; Package: SOD-123; LCSC Part Number: C216719; ComponentLink1Description: LCSC; ComponentLink1URL: https://www.lcsc.com/product-detail/Zener-Diodes_Shikues-BZT52C10_C216719.html
footprint SOD-123
pins: 1 A, 2 K

## BZT52C10-7-F
designator D?
DIODE ZENER 10V 500MW SOD123; Manufacturer: Diodes; Manufacturer Part Number: BZT52C10-7-F; Max Reverse Leakage Current: 200nA; Tolerance: 6%; Forward Voltage: 900mV; Impedance: 20R; Zener Current: 5mA; Output Current: 50mA; ESD Protection: No; Item Type: Zener Diode; Supplier: Future Electronics; Supplier Part Number: 4358016; RoHS: Yes; Category: Zener Diodes; Stock: 387000; Pricing: 3000=0.0141, 12000=0.0135, 45000=0.0129, 120000=0.0126, 300000=0.012 (USD); Mounting Technology: Surface Mount; Pins: 2; Weight: 0.000353oz; Contact Plating: Tin,Matte; Min Operating Temperature: -65°C; Max Operating Temperature: 150°C; Max Power Dissipation: 500mW; Zener Voltage: 10V; Packaging: Tape and Reel; Package Quantity: 3000; Voltage Tolerance: 6%; Max Reverse Current: 200nA; Test Current: 5mA; Power Dissipation: 500mW; Working Voltage: 10V; Termination: SMD/SMT; Power Rating: 500mW; Voltage Rating (DC): 10V; Series: -; Length: 2.85mm; Width: 1.7mm; Height: 1.35mm; Radiation Hardening: No; Lead Free: Lead Free; RoHS Compliant: Yes; ComponentLink1URL: https://datasheet.ciiva.com/15142/getdatasheetpartid-89980-15142547.pdf?src-supplier=Verical; ComponentLink1Description: https://datasheet.ciiva.com/15142/getdatasheetpartid-89980-15142547.pdf?src-supplier=Verical; ComponentLink2URL: https://datasheet.ciiva.com/27052/1539497-27052374.pdf?src-supplier=Jameco; ComponentLink2Description: https://datasheet.ciiva.com/27052/1539497-27052374.pdf?src-supplier=Jameco; LCSC Part Number: C155227
footprint SOD-123
pins: 1 A, 2 K

## BZT52C15LP-7
designator D?
DIODE ZENER 15V 250MW 2DFN; Manufacturer: Diodes; Manufacturer Part Number: BZT52C15LP-7; Max Reverse Leakage Current: 100nA; Element Configuration: Single; Voltage Tolerance: 6%; Zener Current: 5mA; ESD Protection: No; Impedance: 30R; Supplier 1: Digi-Key; RoHS: Yes; Category: Zener Diodes; Stock 1: 18068; Pricing 1: 1=0.48000, 10=0.36000, 100=0.20360, 500=0.13482, 1000=0.10336 (USD); Mount: Surface Mount; Case/Package: DFN; Number of Pins: 2; Contact Plating: Gold; Weight: 3.5E-05oz; Min Operating Temperature: -65°C; Max Operating Temperature: 150°C; Max Power Dissipation: 250mW; Zener Voltage: 15V; Max Reverse Current: 100nA; Test Current: 5mA; Power Dissipation: 250mW; Power Rating: 250mW; Termination: SMD/SMT; Packaging: Tape and Reel; Package Quantity: 3000; Tolerance: 6%; Length: 1mm; Width: 0.6mm; Height: 0.47mm; ComponentLink1URL: https://datasheet.ciiva.com/10642/ds30506-10642784.pdf?src-supplier=Avnet; ComponentLink1Description: https://datasheet.ciiva.com/10642/ds30506-10642784.pdf?src-supplier=Avnet; Supplier Part Number 1: BZT52C15LP-7DICT-ND; LCSC Part Number: C2978911; Item Type: Diode
footprint DFN1006-2L_
pins: 1 K, 2 A

## BZT52C16
designator D?
±5% Single 15.3V~17.1V 500mW 16V SOD-123 Zener Diodes ROHS; Manufacturer: Shikues; Manufacturer Part Number: BZT52C16; Package: SOD-123; LCSC Part Number: C216724; Item Type: Zener Diode; ComponentLink1Description: LCSC; ComponentLink1URL: https://www.lcsc.com/product-detail/Zener-Diodes_Shikues-BZT52C16_C216724.html
footprint SOD-123
pins: 1 A, 2 K

## BZT52C24
designator D?
Independent Type 22.8V~25.6V 500mW 24V SOD-123 Zener Diodes ROHS; Manufacturer: BORN; Manufacturer Part Number: BZT52C24; Package: SOD-123; LCSC Part Number: C266572; Item Type: Zener Diode; ComponentLink1Description: LCSC; ComponentLink1URL: https://www.lcsc.com/product-detail/Zener-Diodes_BORN-BZT52C24_C266572.html
footprint SOD-123
pins: 1 A, 2 K

## BZX84C3V3TS-7-F
designator D?
DIODE ZENER ARRAY 3.3V SOT363; Manufacturer: Diodes Incorporated; Manufacturer Part Number: BZX84C3V3TS-7-F; Package: SOT-363-6; LCSC Part Number: C5124989; Item Type: Diode; ComponentLink1Description: LCSC; ComponentLink1URL: https://www.lcsc.com/product-detail/Zener-Diodes_Diodes-Incorporated-BZX84C3V3TS-7-F_C5124989.html
footprint SOT-363
pins: 1 A1, 2 A2, 3 A3, 4 C3, 5 C2, 6 C1

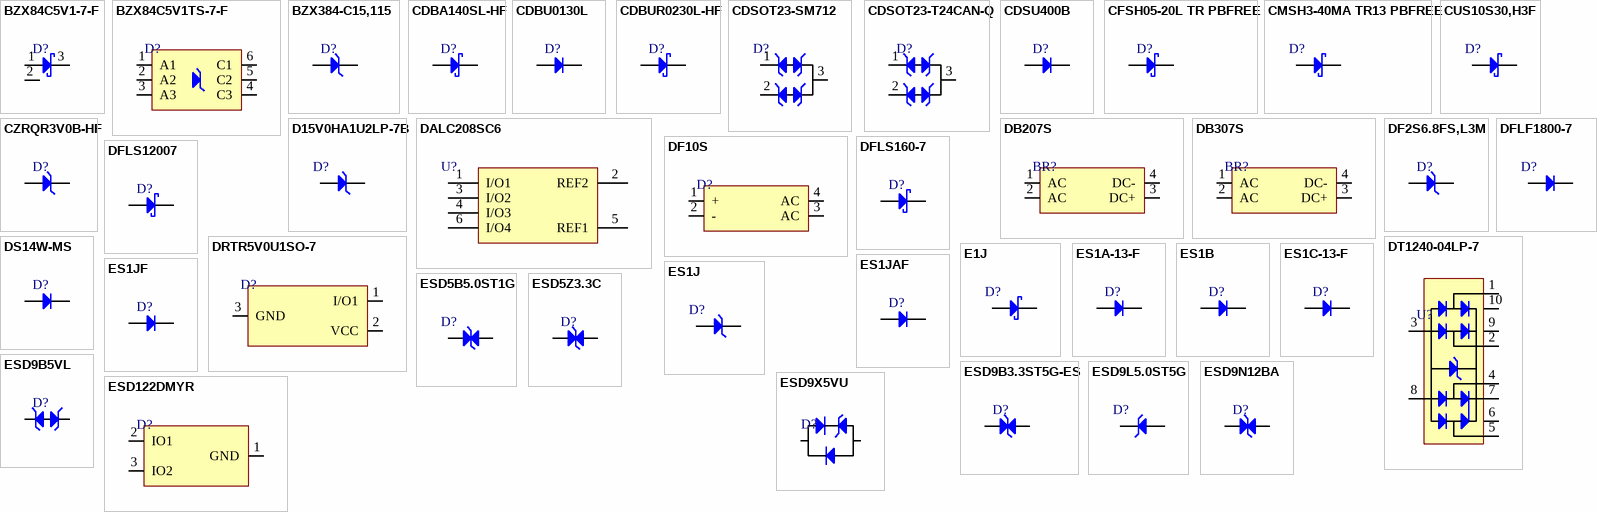
[diagram p2: symbols BZX84C5V1-7-F to ESD122DMYR]

## BZX84C5V1-7-F
designator D?
DIODE ZENER 5.1V 300MW SOT23-3; Manufacturer: Diodes; Manufacturer Part Number: BZX84C5V1-7-F; Max Power Dissipation: 350mW; Max Reverse Leakage Current: 2uA; Tolerance: 6%; Forward Voltage: 900mV; Impedance: 60R; Zener Current: 5mA; Output Current: 50mA; ESD Protection: No; Supplier: Future Electronics; Supplier Part Number: 5442215; RoHS: Yes; Category: Zener Diodes; Stock: 54000; Pricing: 3000=0.017, 12000=0.0163, 30000=0.0158, 75000=0.0153, 120000=0.0147 (USD); Mounting Technology: Surface Mount; Case/Package: SOT-23; Pins: 3; Weight: 0.000282oz; Contact Plating: Tin,Matte; Min Operating Temperature: -65°C; Max Operating Temperature: 150°C; Packaging: Tape and Reel; Zener Voltage: 5.1V; Series: -; Package Quantity: 3000; Power Dissipation: 350mW; Voltage Tolerance: 6%; Working Voltage: 5.1V; Max Reverse Current: 2uA; Test Current: 5mA; Termination: SMD/SMT; Power Rating: 350mW; Voltage Rating (DC): 5.1V; Length: 2.9mm; Width: 1.3mm; Height: 1mm; Radiation Hardening: No; RoHS Compliant: Yes; Reach SVHC Compliant: No; Lead Free: Lead Free; ComponentLink1URL: https://datasheet.ciiva.com/15141/getdatasheetpartid-28228-15141875.pdf?src-supplier=Verical; ComponentLink1Description: https://datasheet.ciiva.com/15141/getdatasheetpartid-28228-15141875.pdf?src-supplier=Verical; ComponentLink2URL: https://datasheet.ciiva.com/34303/2011627-34303826.pdf?src-supplier=Jameco; ComponentLink2Description: https://datasheet.ciiva.com/34303/2011627-34303826.pdf?src-supplier=Jameco; ComponentLink3URL: https://datasheet.ciiva.com/10643/ds18001-10643286.pdf?src-supplier=Avnet; ComponentLink3Description: https://datasheet.ciiva.com/10643/ds18001-10643286.pdf?src-supplier=Avnet; ComponentLink4URL: https://datasheet.ciiva.com/8347/ds18001-8347273.pdf?src-supplier=Avnet; ComponentLink4Description: https://datasheet.ciiva.com/8347/ds18001-8347273.pdf?src-supplier=Avnet; Item Type: Diode
footprint SOT-23 (TRANS NPN 40V 0.6A SOT23)
pins: 1 A, 2 NC, 3 K

## BZX84C5V1TS-7-F
designator D?
DIODE ZENER ARRAY 5.1V SOT363; Manufacturer: Diodes; Manufacturer Part Number: BZX84C5V1TS-7-F; Item Type: Zener Diodes; Supplier: Future Electronics; Supplier Part Number: 5969902; RoHS: Yes; Stock: 117000; Pricing: 3000=0.088, 6000=0.0858, 9000=0.0844, 15000=0.0828, 30000=0.0795 (USD); ComponentLink1URL: https://datasheet.ciiva.com/25623/0900766b8104c789-25623804.pdf?src-supplier=Rs; ComponentLink1Description: https://datasheet.ciiva.com/25623/0900766b8104c789-25623804.pdf?src-supplier=Rs
footprint SOT-363
pins: 1 A1, 2 A2, 3 A3, 4 C3, 5 C2, 6 C1

## BZX384-C15,115
designator D?
DIODE ZENER 15V 300MW SOD323; Manufacturer: Nexperia; Manufacturer Part Number: BZX384-C15,115; Item Type: Diodes; Polarity: 5054Direction; Supplier: Future Electronics; LCSC Part Number: C454989; RoHS: Yes; Stock: 1776000; Pricing: 3000=0.0151, 9000=0.0145, 30000=0.014, 60000=0.0137, 120000=0.0131 (USD); Pins: 2NUMBER; RoHS Compliant: Yes; ComponentLink1URL: https://datasheet.octopart.com/BZX384-C15%2C115-Nexperia-datasheet-155662751.pdf?src-supplier=Future+Electronics; ComponentLink1Description: https://datasheet.octopart.com/BZX384-C15%2C115-Nexperia-datasheet-155662751.pdf?src-supplier=Future+Electronics; ComponentLink2URL: https://assets.nexperia.com/documents/data-sheet/BZX384_SERIES.pdf?src-supplier=Digikey; ComponentLink2Description: https://assets.nexperia.com/documents/data-sheet/BZX384_SERIES.pdf?src-supplier=Digikey; ComponentLink3URL: https://datasheet.octopart.com/BZX384-C15%2C115-NXP-Semiconductors-datasheet-10084396.pdf?src-supplier=Element14; ComponentLink3Description: https://datasheet.octopart.com/BZX384-C15%2C115-NXP-Semiconductors-datasheet-10084396.pdf?src-supplier=Element14; ComponentLink4URL: https://datasheet.octopart.com/BZX384-C15%2C115-Nexperia-datasheet-8360268.pdf?src-supplier=Farnell; ComponentLink4Description: https://datasheet.octopart.com/BZX384-C15%2C115-Nexperia-datasheet-8360268.pdf?src-supplier=Farnell; ComponentLink5URL: https://datasheet.octopart.com/BZX384-C15%2C115-Nexperia-datasheet-68321567.pdf?src-supplier=Newark; ComponentLink5Description: https://datasheet.octopart.com/BZX384-C15%2C115-Nexperia-datasheet-68321567.pdf?src-supplier=Newark; ComponentLink6URL: https://datasheet.octopart.com/BZX384-C15%2C115-Nexperia-datasheet-105678879.pdf?src-supplier=TME; ComponentLink6Description: https://datasheet.octopart.com/BZX384-C15%2C115-Nexperia-datasheet-105678879.pdf?src-supplier=TME
footprint SOD-323
pins: 1 K, 2 A

## CDBA140SL-HF
designator D?
40V Single 1A 270mV@1A SMA(DO-214AC) Schottky Barrier Diodes (SBD) ROHS; Manufacturer: Comchip; Manufacturer Part Number: CDBA140SL-HF; Item Type: Schottky Diode; Package: SMA(DO-214AC); LCSC Part Number: C3012747; ComponentLink1Description: LCSC; ComponentLink1URL: https://www.lcsc.com/product-detail/Schottky-Barrier-Diodes-SBD_Comchip-CDBA140SL-HF_C3012747.html
footprint SMA
pins: 1 K, 2 A

## CDBU0130L
designator D?
DIODE SCHOTTKY 30V 100MA 0603C; Manufacturer: Comchip; Manufacturer Part Number: CDBU0130L; Item Type: Diodes; Supplier: Digikey; LCSC Part Number: C2886023; RoHS: Yes; Stock: 48706; Pricing: 1=0.32, 10=0.201, 100=0.1069, 500=0.09036, 1000=0.0802, 2000=0.07933 (USD); ComponentLink1URL: https://datasheet.ciiva.com/4716/cdbu0130l-reva791956-41311-4716064.pdf?src-supplier=Mouser; ComponentLink1Description: https://datasheet.ciiva.com/4716/cdbu0130l-reva791956-41311-4716064.pdf?src-supplier=Mouser; ComponentLink2URL: https://datasheet.ciiva.com/912/cdbu0130l-reva791956-912529.pdf?src-supplier=Digikey; ComponentLink2Description: https://datasheet.ciiva.com/912/cdbu0130l-reva791956-912529.pdf?src-supplier=Digikey; ComponentLink3URL: https://datasheet.ciiva.com/912/cdbu0130l-reva791956-912530.pdf?src-supplier=Digikey; ComponentLink3Description: https://datasheet.ciiva.com/912/cdbu0130l-reva791956-912530.pdf?src-supplier=Digikey; ComponentLink4URL: https://datasheet.ciiva.com/912/cdbu0130l-reva791956-912531.pdf?src-supplier=Digikey; ComponentLink4Description: https://datasheet.ciiva.com/912/cdbu0130l-reva791956-912531.pdf?src-supplier=Digikey
footprint CDBU0130L-HF
pins: 1 A, 2 K

## CDBUR0230L-HF
designator D?
35V Independent Type 500mV@200mA 200mA SOD-523F Schottky Diodes ROHS; Manufacturer: Comchip; Manufacturer Part Number: CDBUR0230L-HF; Item Type: Diode; Supplier: Mouser; LCSC Part Number: C3012739; RoHS: Yes; Stock: 3840; Pricing: 1=0.38, 10=0.263, 50=0.263, 100=0.133, 1000=0.081, 10000=0.055 (USD); RoHS Compliant: Yes; ComponentLink1URL: http://www.mouser.com/ds/2/80/CDBUR0230L-RevB718340-56369.pdf?src-supplier=Mouser; ComponentLink1Description: http://www.mouser.com/ds/2/80/CDBUR0230L-RevB718340-56369.pdf?src-supplier=Mouser
footprint SOD-523F
pins: 1 A, 2 K

## CDSOT23-SM712
designator D?
TVS DIODE 7V/12V 14V/26V SOT23-3; Manufacturer: Bourns; Manufacturer Part Number: CDSOT23-SM712; Direction: Bidirectional; Value: 75pF; Max Surge Current: 30A; Polarity: Bidirectional,Unidirectional; Number of Channels: 2; Breakdown Voltage: 13.3V; Clamping Voltage: 19V; Working Voltage: 12V; Min Breakdown Voltage: 7.5V; Power Line Protection: No; Leakage Current: 20uA; Peak Pulse Current: 17A; Diode Type: ZENER; Max Power Dissipation: 600W; Peak Pulse Power: 400W; ESD Protection: Yes; Test Current: 1mA; Item Type: Surge Protection (TVS/ESD); Supplier: Rs; Supplier Part Number: 7673728P; RoHS: Yes; Category: TVS Diodes; Stock: 89660; Pricing: 100=0.935, 1500=0.651, 3000=0.565, 6000=0.553 (GBP); Mounting Technology: Surface Mount; Case/Package: SOT-23; Pins: 3; Contact Plating: Tin; Min Operating Temperature: -55°C; Max Operating Temperature: 150°C; Packaging: Tape and Reel; Series: -; Termination: SMD/SMT; Reverse Standoff Voltage: 12V; Number of Elements: 2; Reverse Breakdown Voltage: 13.3V; Number of Bidirectional Channels: 2; Power Dissipation: 400W; Max Reverse Leakage Current: 20uA; Max Breakdown Voltage: 13.3V; Length: 3.04mm; Width: 0.055inch; Height: 1.11mm; Depth: 1.4mm; Radiation Hardening: No; Reach SVHC Compliant: No; RoHS Compliant: Yes; ComponentLink1URL: https://datasheet.ciiva.com/1281/1670933-1281331.pdf?src-supplier=Farnell; ComponentLink1Description: https://datasheet.ciiva.com/1281/1670933-1281331.pdf?src-supplier=Farnell; ComponentLink2URL: https://datasheet.ciiva.com/4510/cdsot23-sm712-25932-4510261.pdf?src-supplier=Mouser; ComponentLink2Description: https://datasheet.ciiva.com/4510/cdsot23-sm712-25932-4510261.pdf?src-supplier=Mouser; ComponentLink3URL: https://datasheet.ciiva.com/11193/cdsot23-sm712-11193846.pdf?src-supplier=Avnet; ComponentLink3Description: https://datasheet.ciiva.com/11193/cdsot23-sm712-11193846.pdf?src-supplier=Avnet; ComponentLink4URL: https://datasheet.ciiva.com/22696/1670933-22696779.pdf?src-supplier=Element14; ComponentLink4Description: https://datasheet.ciiva.com/22696/1670933-22696779.pdf?src-supplier=Element14; ComponentLink5URL: https://datasheet.ciiva.com/26828/getdatasheetpartid-418501-26828522.pdf?src-supplier=Verical; ComponentLink5Description: https://datasheet.ciiva.com/26828/getdatasheetpartid-418501-26828522.pdf?src-supplier=Verical; ComponentLink6URL: https://datasheet.ciiva.com/337/cdsot23-sm712-337451.pdf?src-supplier=Digikey; ComponentLink6Description: https://datasheet.ciiva.com/337/cdsot23-sm712-337451.pdf?src-supplier=Digikey; ComponentLink7URL: https://datasheet.ciiva.com/337/cdsot23-sm712-337452.pdf?src-supplier=Digikey; ComponentLink7Description: https://datasheet.ciiva.com/337/cdsot23-sm712-337452.pdf?src-supplier=Digikey; LCSC Part Number: C404012
footprint SOT-23 (TRANS NPN 40V 0.6A SOT23)
pins: 1 IO1, 2 IO2, 3 GND